# Altium schematic symbol library BUCK - AP63205WU-7.SchLib: 1 symbol
Pins are listed as number, name and electrical type; pins without a type are passive.

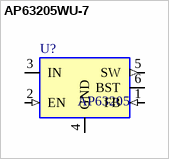
[diagram p0: symbol AP63205WU-7]

## AP63205WU-7
designator U?, comment AP63205
Buck Switching Regulator IC Positive Fixed 5V 1 Output 2A SOT-23-6 Thin, TSOT-23-6; Manufacturer: Diodes Incorporated; Manufacturer Part Number: AP63205WU-7; Supplier 1: DigiKey; Supplier Part Number 1: AP63205WU-7DICT-ND; Supplier 2: LCSC; Supplier Part Number 2: C2071056; Category: Voltage Regulators - DC DC Switching Regulators; Case/Package: SOT-23-6 Thin, TSOT-23-6; Supplier Device Package: TSOT-23-6; Operating Temperature: -40°C ~ 85°C (TA); Lifecycle Status: Active; ComponentLink1Description: Datasheet; ComponentLink1URL: https://www.diodes.com/assets/Datasheets/AP63200-AP63201-AP63203-AP63205.pdf; ComponentLink2Description: DigiKey; ComponentLink2URL: https://www.digikey.com/en/products/result?keywords=AP63205WU-7
footprint TSOT-23-6 - DIODES (Huella TSOT-23-6 - DIODES)
pins: 1 FB (in), 2 EN (in), 3 IN (power), 4 GND (power), 5 SW (out), 6 BST